# Altium footprint library UCP.PcbLib: 222 footprints (part 2 of 14)
Each footprint in its own frame and in the unit in brackets; x right, y up, seen from the top. Pads: shape width x height; smd on the part's side, far side on the other; paste and mask are expansions set on the pad; w line width, h text height; cw(c..) or ccw(c..) is an arc to the next point about the centre after c.
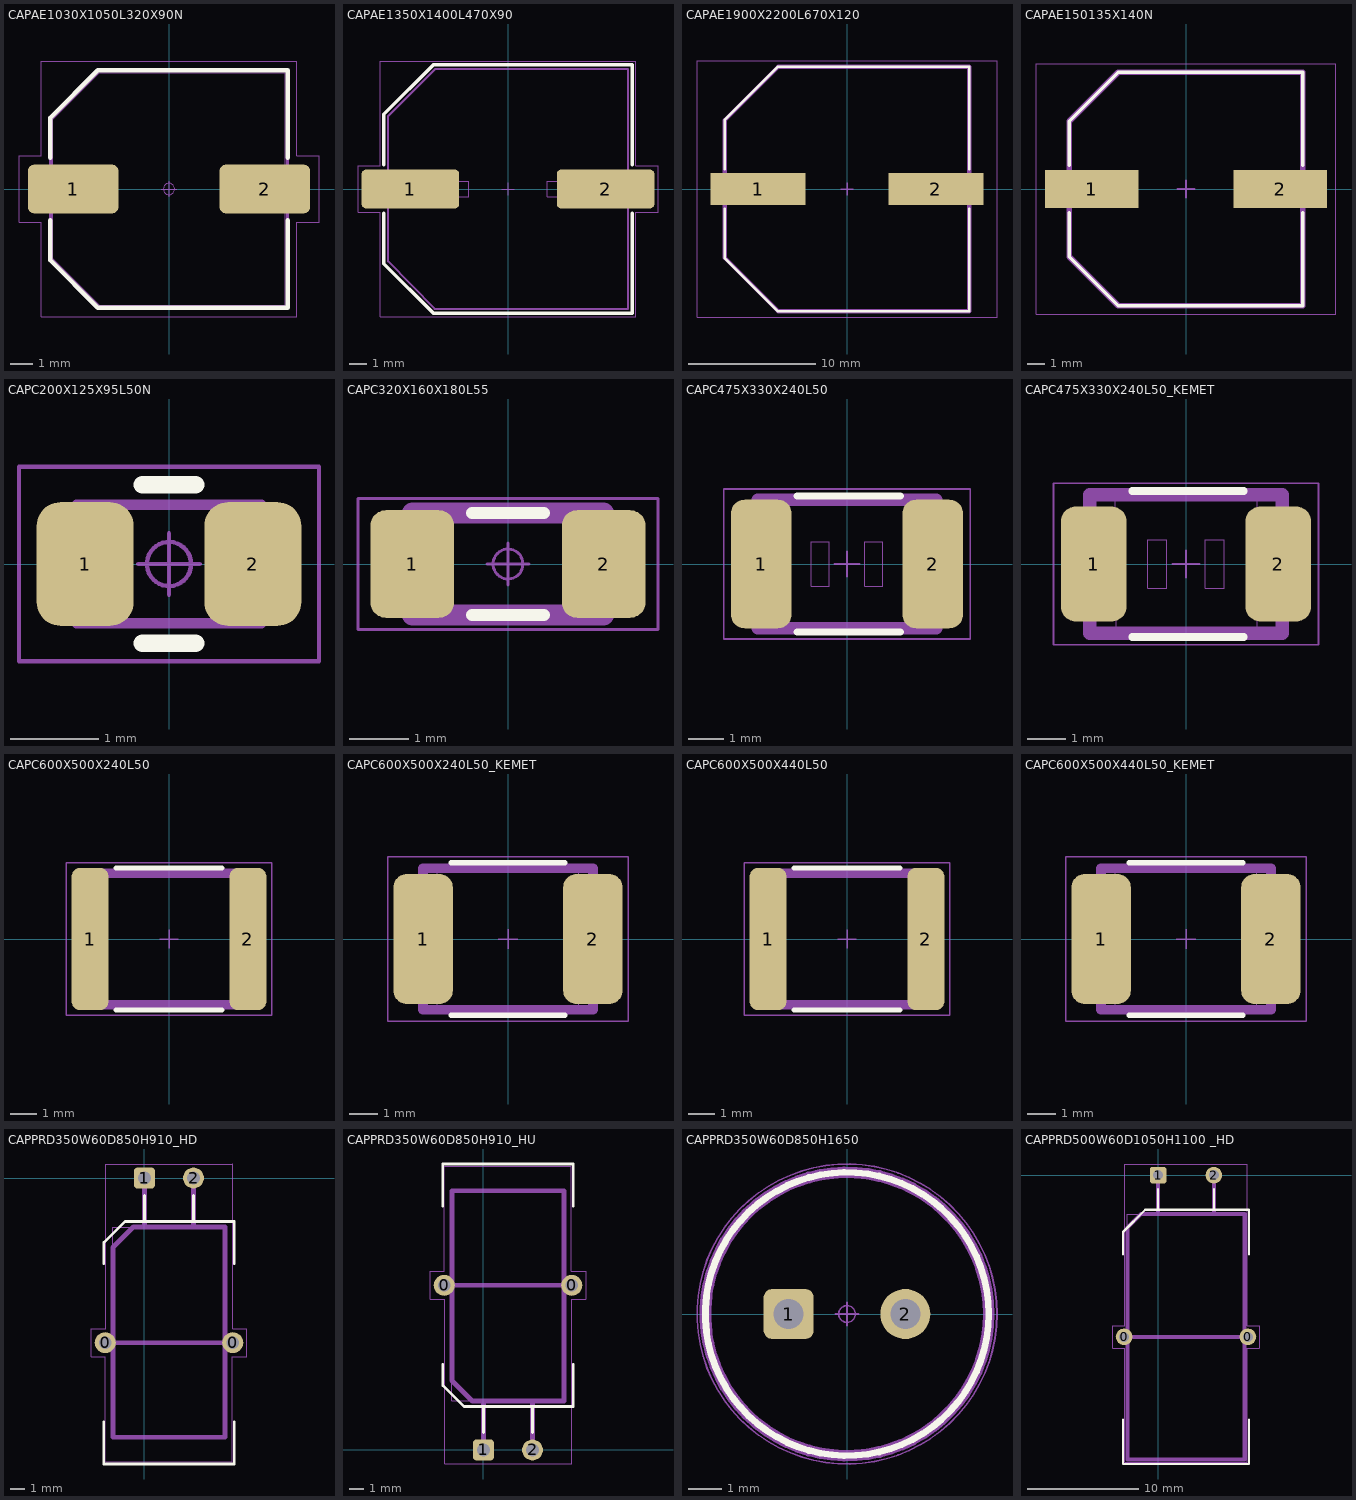
[diagram p1: the footprints below, top view; thin cyan lines are the x and y axes]

## CAPAE1030X1050L320X90N [mm] "Capacitor, Aluminum Electrolytic; 10.30 mm L X 10.30 mm W X 10.50 mm H body"
height 10.5
pads (2):
  rrect23% 4x2.15 smd: 1(-4.245,0) 2(4.245,0)
Top Overlay:
  lines w0.2: -5.25,-1.375 -5.25,-3.16 -3.15,-5.255 5.25,-5.255 5.25,-1.375 ; -5.25,1.375 -5.25,3.16 -3.15,5.255 5.25,5.255 5.25,1.375
Top Designator:
  text ".Designator" at -4.511,-0.453 h2
Top Assembly:
  lines w0.12: -5.25,-3.15 -3.15,-5.25 5.25,-5.25 5.25,5.25 -3.15,5.25 -5.25,3.15 -5.25,-3.15
Top Courtyard:
  circle w0.05: c0,0 r0.25
  lines w0.05: -0.35,0 0.35,0 ; 0,-0.35 0,0.35 ; -6.645,-1.475 -6.645,1.475 -5.65,1.475 -5.65,5.65 5.65,5.65 5.65,1.475 6.645,1.475 6.645,-1.475 5.65,-1.475 5.65,-5.65 -5.65,-5.65 -5.65,-1.475 -6.645,-1.475
Top Component Outline:
  lines w0.025: -5.15,-3.09 -3.09,-5.15 5.15,-5.15 5.15,5.15 -3.09,5.15 -5.15,3.09 -5.15,-3.09
Top Component Terminal:
  lines w0.025: -5.5,-0.45 -2.3,-0.45 -2.3,0.45 -5.5,0.45 -5.5,-0.45 ; 2.3,-0.45 2.3,0.45 5.5,0.45 5.5,-0.45 2.3,-0.45
3D body "CAPAE1030X1050L320X90.STEP": height 10.5, standoff 0, extent -5.5,-5.15 5.5,5.15

## CAPAE1350X1400L470X90 [mm] "Aluminum Electrolytic Capacitor, Body 13,50x13,50x14,00mm, IPC Medium Density"
height 14
pads (2):
  rrect23% 5.5x2.2 smd: 1(-5.5,0) 2(5.5,0)
Top Overlay:
  lines w0.2: -7,-1.375 -7,-4.207 -4.2,-7 7,-7 7,-1.375 ; -7,1.375 -7,4.207 -4.2,7 7,7 7,1.375
Top Designator:
  text ".Designator" at -4.511,-0.453 h2
Top Assembly:
  lines w0.12: -6.75,-4.076 -6.75,4.11 -4.11,6.75 6.75,6.75 6.75,-6.75 -4.126,-6.75 -6.75,-4.076
Top Courtyard:
  lines w0.05: -0.35,0 0.35,0 ; 0,-0.35 0,0.35 ; -8.45,-1.3 -8.45,1.3 -7.2,1.3 -7.2,7.2 7.2,7.2 7.2,1.3 8.45,1.3 8.45,-1.3 7.2,-1.3 7.2,-7.2 -7.2,-7.2 -7.2,-1.3 -8.45,-1.3
Top Component Outline:
  lines w0.025: -6.75,-4.101 -6.75,4.11 -4.11,6.75 6.75,6.75 6.75,-6.75 -4.101,-6.75 -6.75,-4.101
Top Component Terminal:
  lines w0.025: -7,-0.45 -7,0.45 -2.2,0.45 -2.2,-0.45 -7,-0.45 ; 2.2,-0.45 7,-0.45 7,0.45 2.2,0.45 2.2,-0.45
3D body "CAPAE150135X140N.step": height 14, standoff 0, extent -7.5,-6.85 7.5,6.85

## CAPAE1900X2200L670X120 [mm] "Aluminum Electrolytic Capacitor, Body 19,00x19,00x21,00mm, IPC Medium Density"
height 21
pads (2):
  rect 7.5x2.5 smd: 1(-7,0) 2(7,0)
Top Overlay:
  lines w0.2: -9.625,-1.55 -9.625,-5.437 -5.438,-9.625 9.625,-9.625 9.625,-1.55 ; -9.625,1.55 -9.625,5.437 -5.438,9.625 9.625,9.625 9.625,1.55
Top Designator:
  text ".Designator" at -4.511,-0.453 h2
Top Assembly:
  lines w0.35: -9.6,-5.425 -9.6,5.425 -5.425,9.6 9.6,9.6 9.6,-9.6 -5.425,-9.6 -9.6,-5.425
Top Courtyard:
  lines w0.05: -11.8,-10.1 11.8,-10.1 11.8,10.1 -11.8,10.1 -11.8,-10.1
  lines w0.1: -0.5,0 0.5,0 ; 0,-0.5 0,0.5
3D body "CAPAE1900X2200L670X120.step": height 21, standoff 0, extent -10.5,-9.6 10.5,9.6

## CAPAE150135X140N [mm] "Aluminum Electrolytic Capacitor, Body 13,50x13,50x14,00mm, IPC Medium Density"
height 14
pads (2):
  rect 5.5x2.2 smd: 1(-5.525,0) 2(5.525,0)
Top Overlay:
  lines w0.2: -6.85,-1.4 -6.85,-3.975 -3.975,-6.85 6.85,-6.85 6.85,-1.4 ; -6.85,1.4 -6.85,3.975 -3.975,6.85 6.85,6.85 6.85,1.4
Top Assembly:
  lines w0.35: -6.85,-3.975 -3.975,-6.85 6.85,-6.85 6.85,6.85 -3.975,6.85 -6.85,3.975 -6.85,-3.975
Top Courtyard:
  lines w0.05: -8.8,-7.35 -8.8,7.35 8.8,7.35 8.8,-7.35 -8.8,-7.35
  lines w0.1: -0.5,0 0.5,0 ; 0,-0.5 0,0.5
3D body "CAPAE150135X140N.step": height 14, standoff 0, extent -7.5,-6.85 7.5,6.85

## CAPC200X125X95L50N [mm] "Capacitor, Chip; 2.00 mm L X 1.25 mm W X 0.95 mm H body"
height 0.95
pads (2):
  rrect48% 1.1x1.4 smd: 1(-0.95,0) 2(0.95,0)
Top Overlay:
  lines w0.2: -0.3,-0.9 0.3,-0.9 ; -0.3,0.9 0.3,0.9
Top Designator:
  text ".Designator" at -4.511,-0.453 h2
Top Assembly:
  lines w0.1: -1.05,-0.68 1.05,-0.68 1.05,0.68 -1.05,0.68 -1.05,-0.68
Top Courtyard:
  circle w0.05: c0,0 r0.25
  lines w0.05: -0.35,0 0.35,0 ; 0,-0.35 0,0.35 ; -1.7,-1.1 -1.7,1.1 1.7,1.1 1.7,-1.1 -1.7,-1.1
Top Component Outline:
  lines w0.025: -1,-0.625 1,-0.625 1,0.625 -1,0.625 -1,-0.625
Top Component Terminal:
  lines w0.025: -1,-0.625 -1,0.625 -0.5,0.625 -0.5,-0.625 -1,-0.625 ; 0.5,-0.625 1,-0.625 1,0.625 0.5,0.625 0.5,-0.625
3D body "CAPC200X125X95L50.STEP": height 0.95, standoff 0, extent -1,-0.625 1,0.625

## CAPC320X160X180L55 [mm] "Capacitor, Chip; 3.20 mm L X 1.60 mm W X 1.80 mm H body"
height 1.8
pads (2):
  rrect36% 1.4x1.8 smd: 1(-1.6,0) 2(1.6,0)
Top Overlay:
  lines w0.2: -0.605,-0.85 0.605,-0.85 ; -0.605,0.85 0.605,0.85
Top Designator:
  text ".Designator" at 0,0 h2
Top Assembly:
  lines w0.35: -1.6,-0.85 1.6,-0.85 1.6,0.85 -1.6,0.85 -1.6,-0.85
Top Courtyard:
  circle w0.05: c0,0 r0.25
  lines w0.05: -0.35,0 0.35,0 ; 0,-0.35 0,0.35 ; -2.51,-1.1 2.51,-1.1 2.51,1.1 -2.51,1.1 -2.51,-1.1
Top Component Outline:
  lines w0.05: 1.55,0.8 1.55,-0.8 -1.6,-0.8 -1.6,0.8 1.6,0.8
Top Component Terminal:
  lines w0.05: -1.6,-0.8 -1.6,0.8 -1.05,0.8 -1.05,-0.8 -1.6,-0.8 ; 1.05,-0.8 1.6,-0.8 1.6,0.8 1.05,0.8 1.05,-0.8
3D body "CAPC320X160X180L55.stp": height 1.8, standoff 0, extent -1.6,-0.8 1.6,0.8

## CAPC475X330X240L50 [mm] "Capacitor, Chip; 2.00 mm L X 1.25 mm W X 0.95 mm H body"
height 2
pads (2):
  rrect45% 1.7x3.6 smd: 1(-2.4,0) 2(2.4,0)
Top Overlay:
  lines w0.2: -1.4,-1.9 1.5,-1.9 ; -1.4,1.9 1.5,1.9
Top Designator:
  text ".Designator" at -4.511,-0.453 h2
Top Assembly:
  lines w0.35: -2.5,-1.8 -2.5,1.8 2.5,1.8 2.5,-1.8 -2.5,-1.8
Top Courtyard:
  lines w0.05: -0.35,0 0.35,0 ; 0,-0.35 0,0.35 ; -3.45,-2.1 -3.45,2.1 3.45,2.1 3.45,-2.1 -3.45,-2.1
Top Component Outline:
  lines w0.025: -2.35,-1.65 2.35,-1.65 2.35,1.65 -2.35,1.65 -2.35,-1.65
Top Component Terminal:
  lines w0.025: -2.35,-1.65 -2.35,1.65 -1.85,1.65 -1.83,-1.65 -2.35,-1.65 ; -1,-0.625 -1,0.625 -0.5,0.625 -0.5,-0.625 -1,-0.625 ; 0.5,-0.625 1,-0.625 1,0.625 0.5,0.625 0.5,-0.625 ; 1.85,-1.65 1.85,1.65 2.35,1.65 2.37,-1.65 1.85,-1.65
3D body "CAPC475X330X240L50.stp": height 2.4, standoff 0, extent -2.35,-1.65 2.35,1.65

## CAPC475X330X240L50_KEMET [mm] "Capacitor, Chip; 2.00 mm L X 1.25 mm W X 0.95 mm H body"
height 2
pads (2):
  rrect45% 1.7x3 smd: 1(-2.4,0) 2(2.4,0)
Top Overlay:
  lines w0.2: -1.4,-1.9 1.5,-1.9 ; -1.4,1.9 1.5,1.9
Top Designator:
  text ".Designator" at -4.511,-0.453 h2
Top Assembly:
  lines w0.35: -2.5,-1.8 -2.5,1.8 2.5,1.8 2.5,-1.8 -2.5,-1.8
Top Courtyard:
  lines w0.05: -0.35,0 0.35,0 ; 0,-0.35 0,0.35 ; -3.45,-2.1 -3.45,2.1 3.45,2.1 3.45,-2.1 -3.45,-2.1
Top Component Outline:
  lines w0.025: -2.35,-1.65 2.35,-1.65 2.35,1.65 -2.35,1.65 -2.35,-1.65
Top Component Terminal:
  lines w0.025: -2.35,-1.65 -2.35,1.65 -1.85,1.65 -1.83,-1.65 -2.35,-1.65 ; -1,-0.625 -1,0.625 -0.5,0.625 -0.5,-0.625 -1,-0.625 ; 0.5,-0.625 1,-0.625 1,0.625 0.5,0.625 0.5,-0.625 ; 1.85,-1.65 1.85,1.65 2.35,1.65 2.37,-1.65 1.85,-1.65
3D body "CAPC475X330X240L50.stp": height 2.4, standoff 0, extent -2.35,-1.65 2.35,1.65

## CAPC600X500X240L50 [mm] "Capacitor, Chip; 6.00 mm L X 5.00 mm W X 2.4 mm H body"
height 2.4
pads (2):
  rrect45% 1.4x5.4 smd: 1(-3,0) 2(3,0)
Top Overlay:
  lines w0.2: -2,-2.7 2,-2.7 ; -2,2.7 2,2.7
Top Designator:
  text ".Designator" at -4.511,-0.453 h2
Top Assembly:
  lines w0.35: -3,-2.5 -3,2.5 3,2.5 3,-2.5 -3,-2.5
Top Courtyard:
  lines w0.05: -0.35,0 0.35,0 ; 0,-0.35 0,0.35 ; -3.9,-2.9 -3.9,2.9 3.9,2.9 3.9,-2.9 -3.9,-2.9
Top Component Outline:
  lines w0.025: -3,-2.5 -3,2.5 3,2.5 3,-2.5 -3,-2.5
Top Component Terminal:
  lines w0.025: -3,-2.5 -3,2.5 -2.5,2.5 -2.5,-2.5 -3,-2.5 ; 2.5,-2.5 2.5,2.5 3,2.5 3,-2.5 2.5,-2.5
3D body "CAPC600X500X240L50.stp": height 2.4, standoff 0, extent -3,-2.5 3,2.5

## CAPC600X500X240L50_KEMET [mm] "Capacitor, Chip; 6.00 mm L X 5.00 mm W X 2.4 mm H body"
height 2.4
pads (2):
  rrect45% 2.1x4.6 smd: 1(-3,0) 2(3,0)
Top Overlay:
  lines w0.2: -2,-2.7 2,-2.7 ; -2,2.7 2,2.7
Top Designator:
  text ".Designator" at -4.511,-0.453 h2
Top Assembly:
  lines w0.35: -3,-2.5 3,-2.5 3,2.5 -3,2.5 -3,-2.5
Top Courtyard:
  lines w0.05: -0.35,0 0.35,0 ; 0,-0.35 0,0.35 ; -4.25,-2.9 4.25,-2.9 4.25,2.9 -4.25,2.9 -4.25,-2.9
Top Component Outline:
  lines w0.025: -3,-2.5 3,-2.5 3,2.5 -3,2.5 -3,-2.5
Top Component Terminal:
  lines w0.025: -3,-2.5 -2.5,-2.5 -2.5,2.5 -3,2.5 -3,-2.5 ; 2.5,-2.5 3,-2.5 3,2.5 2.5,2.5 2.5,-2.5
3D body "CAPC600X500X240L50.stp": height 2.4, standoff 0, extent -3,-2.5 3,2.5

## CAPC600X500X440L50 [mm] "Capacitor, Chip; 6.00 mm L X 5.00 mm W X 4.4 mm H body"
height 4.4
pads (2):
  rrect45% 1.4x5.4 smd: 1(-3,0) 2(3,0)
Top Overlay:
  lines w0.2: -2,-2.7 2,-2.7 ; -2,2.7 2,2.7
Top Designator:
  text ".Designator" at -4.511,-0.453 h2
Top Assembly:
  lines w0.35: -3,-2.5 -3,2.5 3,2.5 3,-2.5 -3,-2.5
Top Courtyard:
  lines w0.05: -0.35,0 0.35,0 ; 0,-0.35 0,0.35 ; -3.9,-2.9 -3.9,2.9 3.9,2.9 3.9,-2.9 -3.9,-2.9
Top Component Outline:
  lines w0.025: -3,-2.5 -3,2.5 3,2.5 3,-2.5 -3,-2.5
Top Component Terminal:
  lines w0.025: -3,-2.5 -3,2.5 -2.5,2.5 -2.5,-2.5 -3,-2.5 ; 2.5,-2.5 2.5,2.5 3,2.5 3,-2.5 2.5,-2.5
3D body "CAPC600X500X440L50.stp": height 4.4, standoff 0, extent -3,-2.5 3,2.5

## CAPC600X500X440L50_KEMET [mm] "Capacitor, Chip; 6.00 mm L X 5.00 mm W X 4.4 mm H body"
height 4.4
pads (2):
  rrect45% 2.1x4.6 smd: 1(-3,0) 2(3,0)
Top Overlay:
  lines w0.2: -2,-2.7 2,-2.7 ; -2,2.7 2,2.7
Top Designator:
  text ".Designator" at -4.511,-0.453 h2
Top Assembly:
  lines w0.35: -3,-2.5 -3,2.5 3,2.5 3,-2.5 -3,-2.5
Top Courtyard:
  lines w0.05: -0.35,0 0.35,0 ; 0,-0.35 0,0.35 ; -4.25,-2.9 -4.25,2.9 4.25,2.9 4.25,-2.9 -4.25,-2.9
Top Component Outline:
  lines w0.025: -3,-2.5 -3,2.5 3,2.5 3,-2.5 -3,-2.5
Top Component Terminal:
  lines w0.025: -3,-2.5 -3,2.5 -2.5,2.5 -2.5,-2.5 -3,-2.5 ; 2.5,-2.5 2.5,2.5 3,2.5 3,-2.5 2.5,-2.5
3D body "CAPC600X500X440L50.stp": height 4.4, standoff 0, extent -3,-2.5 3,2.5

## CAPPRD350W60D850H910_HD [mm] "Capacitor, Polarized, Radial (Electrolytic); 3.50 mm C X 8.50 mm Dia X 16.50 mm H body"
height 9.1
pads (4):
  round 1.5 hole 0.9 paste-1.5: 0(-2.8,-11.755) 0(6.3,-11.755) 2(3.5,0)
  rrect33% 1.5x1.5 hole 0.9 paste-1.5: 1(0,0)
Top Overlay:
  lines w0.2: -2.9,-17.41 -2.9,-20.41 6.4,-20.41 6.4,-17.41 ; -2.9,-6.1 -2.9,-4.6 -1.4,-3.1 6.4,-3.1 6.4,-6.1 ; 0,-3.1 0,-1.25 ; 3.5,-3.1 3.5,-1.25
Top Designator:
  text ".Designator" at -4.511,-0.453 h2
Top Assembly:
  lines w0.35: -2.8,-11.755 6.3,-11.755 ; 0,-3.5 0,0 ; 3.5,-3.5 3.5,0 ; -2.25,-18.5 5.75,-18.5 5.75,-3.5 -0.8,-3.5 -2.25,-4.95 -2.25,-18.5
Top Courtyard:
  circle w0.05: c0,0 r0.25
  lines w0.05: -3.8,-12.755 -3.8,-10.75 -2.75,-10.755 -2.75,1 6.3,1 6.3,-10.755 7.295,-10.755 ; -3.795,-12.755 -2.8,-12.755 -2.8,-20.235 ; -2.775,-20.26 6.275,-20.26 ; -0.35,0 0.35,0 ; 0,-0.35 0,0.35 ; 6.25,-20.235 6.25,-12.755 7.3,-12.76 7.3,-10.755
Top Component Outline:
  lines w0.05: -2.25,-18.5 5.75,-18.5 5.75,-3.5 -2.25,-3.5 -2.25,-18.5
Top Component Terminal:
  circle w0.05: c0,0 r0.325
  circle w0.05: c3.5,0 r0.325
3D body "CAPPRD350W60D850H1650.stp": height 9.34, standoff -3.25, extent -3.099,-20.01 6.6,0.298

## CAPPRD350W60D850H910_HU [mm] "Capacitor, Polarized, Radial (Electrolytic); 3.50 mm C X 8.50 mm Dia X 16.50 mm H body"
height 9.1
pads (4):
  round 1.5 hole 0.9 paste-1.5: 0(-2.8,11.755) 0(6.3,11.755) 2(3.5,0)
  rrect33% 1.5x1.5 hole 0.9 paste-1.5: 1(0,0)
Top Overlay:
  lines w0.2: -2.9,6.1 -2.9,4.6 -1.4,3.1 6.4,3.1 6.4,6.1 ; -2.9,17.41 -2.9,20.41 6.4,20.41 6.4,17.41 ; 0,1.25 0,3.1 ; 3.5,1.25 3.5,3.1
Top Designator:
  text ".Designator" at -4.511,-0.453 h2
Top Assembly:
  lines w0.35: -2.8,11.755 6.3,11.755 ; 0,0 0,3.5 ; 3.5,0 3.5,3.5 ; -2.25,4.95 -0.8,3.5 5.75,3.5 5.75,18.5 -2.25,18.5 -2.25,4.95
Top Courtyard:
  circle w0.05: c0,0 r0.25
  lines w0.05: -3.8,12.755 -3.8,10.75 -2.75,10.755 -2.75,-1 6.3,-1 6.3,10.755 7.295,10.755 ; -3.795,12.755 -2.8,12.755 -2.8,20.235 ; -2.775,20.26 6.275,20.26 ; -0.35,0 0.35,0 ; 0,-0.35 0,0.35 ; 6.25,20.235 6.25,12.755 7.3,12.76 7.3,10.755
Top Component Outline:
  lines w0.05: -2.25,3.5 5.75,3.5 5.75,18.5 -2.25,18.5 -2.25,3.5
Top Component Terminal:
  circle w0.05: c3.5,0 r0.325
  circle w0.05: c0,0 r0.325
3D body "CAPPRD350W60D850H1650_MIR.stp": height 9.09, standoff -3.5, extent -3.099,-0.298 6.6,20.01

## CAPPRD350W60D850H1650 [mm] "Capacitor, Polarized, Radial (Electrolytic); 3.50 mm C X 8.50 mm Dia X 16.50 mm H body"
height 16.5
pads (2):
  rrect33% 1.5x1.5 / inner round 1.5 / far side rrect33% 1.5x1.5 hole 0.9 paste-1.5: 1(-1.75,0)
  round 1.5 hole 0.9 paste-1.5: 2(1.75,0)
Top Overlay:
  circle w0.2: c0,0 r4.25
Top Designator:
  text ".Designator" at -4.511,-0.453 h2
Top Assembly:
  circle w0.35: c0,0 r4.25
Top Courtyard:
  circle w0.05: c0,0 r0.25
  circle w0.05: c0,0 r4.5
  lines w0.05: -0.35,0 0.35,0 ; 0,-0.35 0,0.35
Top Component Outline:
  circle w0.05: c0,0 r4.25
Top Component Terminal:
  circle w0.05: c1.75,0 r0.325
  circle w0.05: c-1.75,0 r0.325
3D body "CAPPRD350W60D850H1650.STEP": height 16.51, standoff -2, extent -4.25,-4.25 4.26,4.25

## CAPPRD500W60D1050H1100 _HD [mm] "Capacitor, Polarized, Radial (Electrolytic); 5.00 mm C X 10.50 mm Dia X 22.00 mm H body"
height 11
pads (4):
  round 1.5 hole 0.9 paste-1.5: 0(-3.05,-14.5) 0(8.05,-14.5) 2(5,0)
  rrect33% 1.5x1.5 hole 0.9 paste-1.5: 1(0,0)
Top Overlay:
  lines w0.2: -3.15,-21.9 -3.15,-25.9 8.15,-25.9 8.15,-21.9 ; -3.15,-7.1 -3.15,-5.1 -1.15,-3.1 8.15,-3.1 8.15,-7.1 ; 0,-3.1 0,-1.25 ; 5,-3.1 5,-1.25
Top Designator:
  text ".Designator" at -4.511,-0.453 h2
Top Assembly:
  lines w0.35: -3.05,-14.5 8.05,-14.5 ; 0,-3.487 0,0 ; 5,-3.487 5,0 ; -2.75,-25.5 -2.75,-4.7 -1.55,-3.5 7.75,-3.5 7.75,-25.5 -2.75,-25.5
Top Courtyard:
  circle w0.05: c0,0 r0.25
  lines w0.05: -0.35,0 0.35,0 ; 0,-0.35 0,0.35 ; -4.05,-15.5 -4.05,-13.5 -3,-13.5 -3,1 8,1 8,-13.5 9.05,-13.5 9.05,-15.5 8,-15.5 8,-25.75 -3,-25.75 -3,-15.5 -4.05,-15.5
Top Component Outline:
  lines w0.05: -2.75,-25.5 7.75,-25.5 7.75,-3.5 -2.75,-3.5 -2.75,-25.5
Top Component Terminal:
  circle w0.05: c0,0 r0.325
  circle w0.05: c5,0 r0.325
3D body "CAPPRD500W60D1050H1100_HD.stp": height 11.1, standoff -3.5, extent -3.348,-25.51 8.348,0.299